# Altium footprint library Amin-Library.PcbLib: 601 footprints (part 9 of 38)
Each footprint in its own frame and in the unit in brackets; x right, y up, seen from the top. Pads: shape width x height; smd on the part's side, far side on the other; paste and mask are expansions set on the pad; w line width, h text height; cw(c..) or ccw(c..) is an arc to the next point about the centre after c.
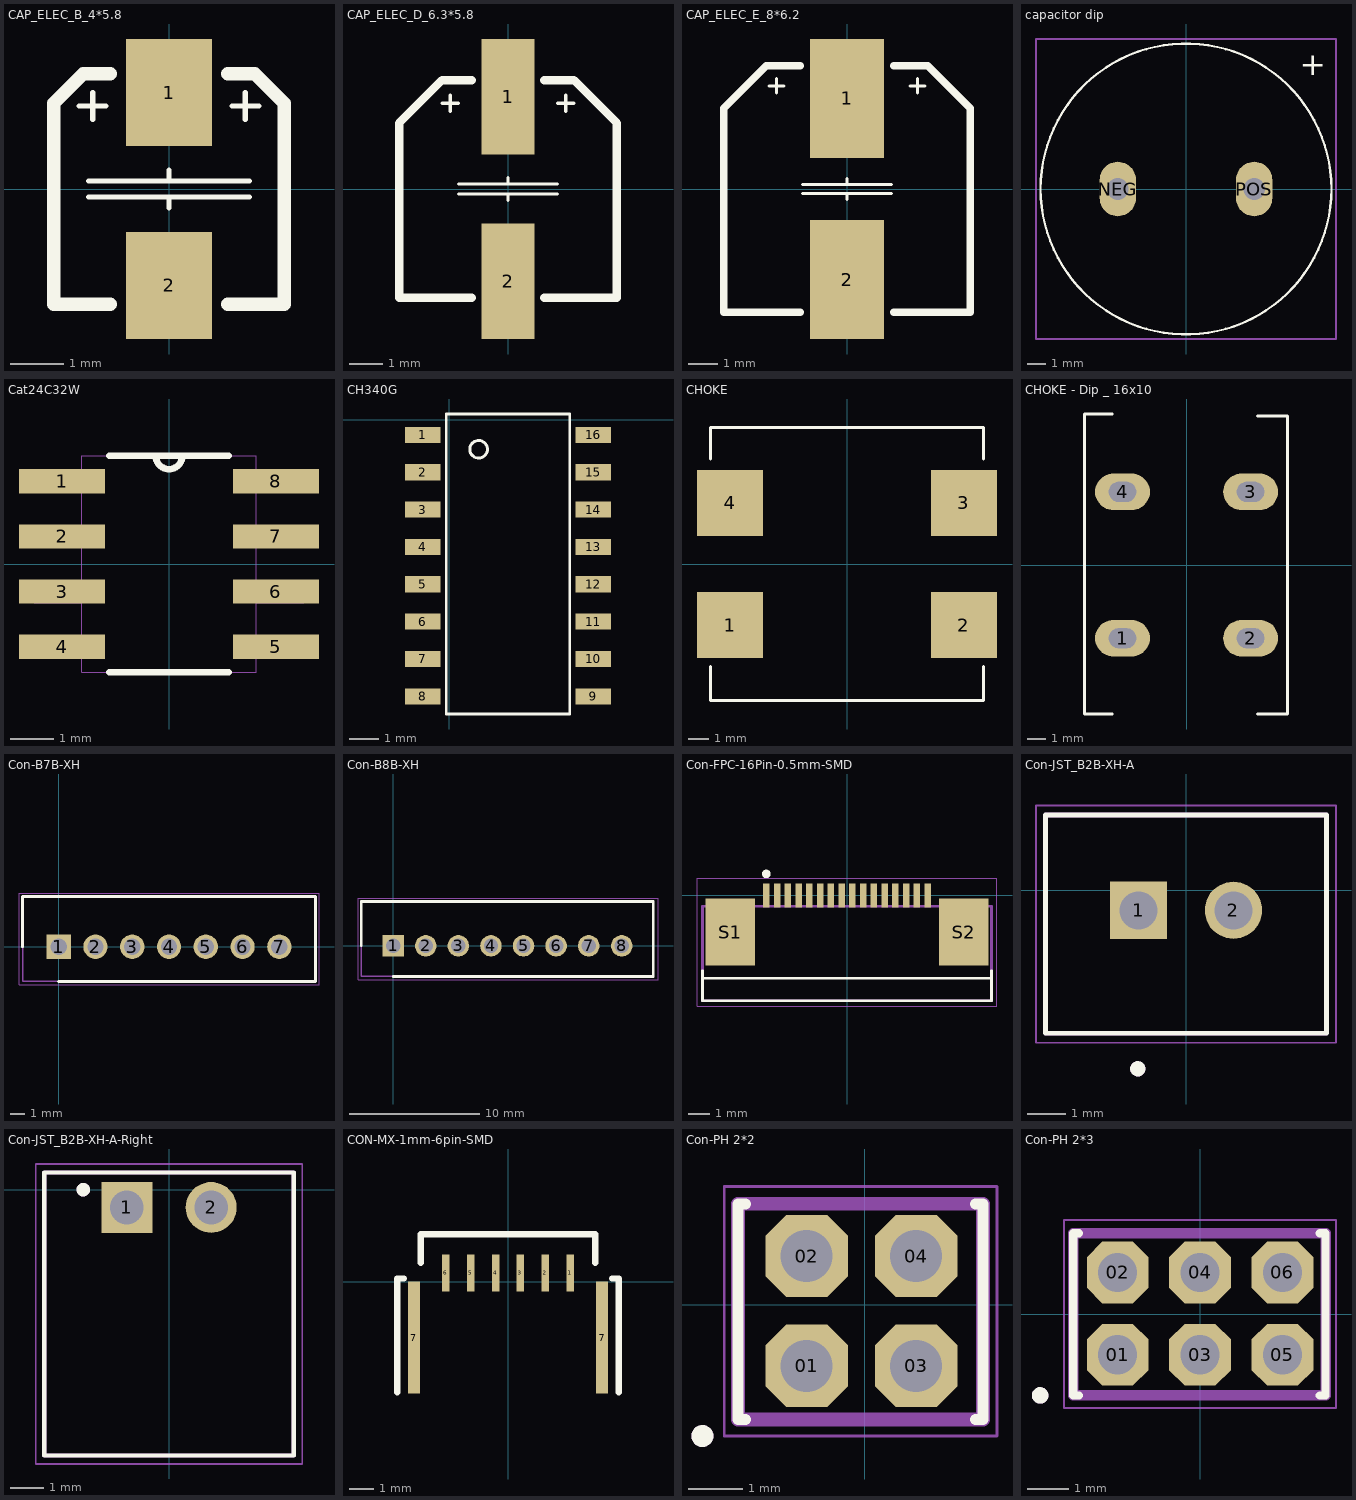
[diagram p8: the footprints below, top view; thin cyan lines are the x and y axes]

## CAP_ELEC_B_4*5.8 [mm] "Size B - Diameter 4 - Height 5.8"
pads (2):
  rect 1.6x2 smd: 1(0,1.8) 2(0,-1.8)
Top Overlay:
  lines w0.1: -1.675,1.55 -1.175,1.55 ; -1.5,-0.15 1.5,-0.15 ; -1.5,0.15 1.5,0.15 ; -1.425,1.3 -1.425,1.8 ; 0,-0.35 0,-0.15 ; 0,0.15 0,0.35 ; 1.175,1.55 1.675,1.55 ; 1.425,1.3 1.425,1.8
  lines w0.254: -1.1,-2.15 -2.15,-2.15 -2.15,1.6 -1.6,2.15 -1.1,2.15 ; 1.1,-2.15 2.15,-2.15 2.15,1.6 1.6,2.15 1.1,2.15

## CAP_ELEC_D_6.3*5.8 [mm] "Size D - Diameter 6.3 - Height 5.8"
pads (2):
  rect 1.6x3.5 smd: 1(0,2.8) 2(0,-2.8)
Top Overlay:
  lines w0.1: -2,2.6 -1.5,2.6 ; -1.75,2.35 -1.75,2.85 ; -1.5,-0.15 1.5,-0.15 ; -1.5,0.15 1.5,0.15 ; 0,-0.35 0,-0.15 ; 0,0.15 0,0.35 ; 1.5,2.6 2,2.6 ; 1.75,2.35 1.75,2.85
  lines w0.254: -1.1,-3.3 -3.3,-3.3 -3.3,2 -2,3.3 -1.1,3.3 ; 1.1,-3.3 3.3,-3.3 3.3,1.975 ; 1.1,3.3 1.975,3.3 ; 2,3.3 3.3,2

## CAP_ELEC_E_8*6.2 [mm] "Size E - Diameter 8 - Height 6.2"
pads (2):
  rect 2.5x4 smd: 1(0,3.05) 2(0,-3.05)
Top Overlay:
  lines w0.1: -2.625,3.475 -2.125,3.475 ; -2.375,3.225 -2.375,3.725 ; -1.5,-0.15 1.5,-0.15 ; -1.5,0.15 1.5,0.15 ; 0,-0.35 0,-0.15 ; 0,0.15 0,0.35 ; 2.125,3.475 2.625,3.475 ; 2.375,3.225 2.375,3.725
  lines w0.254: -1.575,-4.15 -4.15,-4.15 -4.15,2.725 -2.725,4.15 -1.575,4.15 ; 1.57,4.15 2.725,4.15 4.15,2.725 4.15,-4.15 1.575,-4.15

## capacitor dip [mm]
pads (2):
  oval 2x3 hole 1.2: NEG(-3.75,0) POS(3.75,0)
Top Overlay:
  circle w0.127: c0,0 r8
  text "+" at 6.251,6.251 h1.27
Mechanical 15:
  lines w0.127: -8.25,-8.25 -8.25,8.25 8.25,8.25 8.25,-8.25 -8.25,-8.25
3D body "User Library-ECEC2DP271BJ.step": height 25.01, standoff 0.01, extent -10.824,-10.873 11.176,11.127

## Cat24C32W [mil]
pads (8):
  rect 78x22 smd: 1(-97,75) 2(-97,25) 3(-97,-25) 4(-97,-75) 5(97,-75) 6(97,-25) 7(97,25) 8(97,75)
Top Overlay:
  lines w6: -54,-98 54,-98 ; -54,98 -12,98 ; 54,98 12,98 ; -12,98 ccw(c0,98) 12,98 ; -12,98 12,98
Mechanical 4:
  lines w0: -122,-85 -122,-65 ; -122,-85 -79,-85 ; -122,-85 -122,-65 ; -122,-85 -79,-85 ; -122,-65 -79,-65 ; -122,-65 -79,-65 ; -122,-35 -122,-15 ; -122,-35 -79,-35 ; -122,-35 -122,-15 ; -122,-35 -79,-35 ; -122,-15 -79,-15 ; -122,-15 -79,-15 ; -122,15 -122,35 ; -122,15 -79,15 ; -122,15 -122,35 ; -122,15 -79,15 ; -122,35 -79,35 ; -122,35 -79,35 ; -122,65 -122,85 ; -122,65 -79,65 ; -122,65 -122,85 ; -122,65 -79,65 ; -122,85 -79,85 ; -122,85 -79,85 ; -79,-98 79,-98 ; -79,-98 -79,98 ; -79,-98 79,-98 ; -79,-98 -79,98 ; -79,-85 -79,-65 ; -79,-85 -79,-65 ; -79,-35 -79,-15 ; -79,-35 -79,-15 ; -79,15 -79,35 ; -79,15 -79,35 ; -79,65 -79,85 ; -79,65 -79,85 ; -79,98 -12,98 ; -79,98 -12,98 ; -12,98 ccw(c0,98) 12,98 ; -12,98 ccw(c0,98) 12,98 ; -12,98 12,98 ; -12,98 12,98 ; 12,98 79,98 ; 12,98 79,98 ; 79,-98 79,98 ; 79,-98 79,98 ; 79,-85 79,-65 ; 79,-85 122,-85 ; 79,-85 79,-65 ; 79,-85 122,-85 ; 79,-65 122,-65 ; 79,-65 122,-65 ; 79,-35 79,-15 ; 79,-35 122,-35 ; 79,-35 79,-15 ; 79,-35 122,-35 ; 79,-15 122,-15 ; 79,-15 122,-15 ; 79,15 79,35 ; 79,15 122,15 ; 79,15 79,35 ; 79,15 122,15 ; 79,35 122,35 ; 79,35 122,35 ; 79,65 79,85 ; 79,65 122,65 ; 79,65 79,85 ; 79,65 122,65 ; 79,85 122,85 ; 79,85 122,85 ; 122,-85 122,-65 ; 122,-85 122,-65 ; 122,-35 122,-15 ; 122,-35 122,-15 ; 122,15 122,35 ; 122,15 122,35 ; 122,65 122,85 ; 122,65 122,85
3D body "MAX1562ESA+--3DModel-STEP-56544.STEP": height 59.56, standoff -9.34, extent -118.1,-96.46 118.11,96.45

## CH340G [mm]
pads (16):
  rect 1.2x0.55 smd: 1(-0.9,-0.51) 2(-0.9,-1.78) 3(-0.9,-3.05) 4(-0.9,-4.32) 5(-0.9,-5.59) 6(-0.9,-6.86) 7(-0.9,-8.13) 8(-0.9,-9.4) 9(4.9,-9.4) 10(4.9,-8.13) 11(4.9,-6.86) 12(4.9,-5.59) 13(4.9,-4.32) 14(4.9,-3.05) 15(4.9,-1.78) 16(4.9,-0.51)
Top Overlay:
  circle w0.1: c1,-1 r0.3
  lines w0.1: -0.1,-10 -0.1,0.2 4.1,0.2 4.1,-10 -0.1,-10
3D body "SO-16.step": height 1.45, standoff 0, extent -0.953,-9.9 4.953,0.082

## CHOKE [mm] "SMD Common MODE Filter"
height 10
pads (4):
  rect 3.2x3.2 smd: 1(-5.65,-2.95) 2(5.65,-2.95) 3(5.65,2.95) 4(-5.65,2.95)
Top Overlay:
  lines w0.152: -6.6,-4.953 -6.6,-6.6 6.6,-6.6 6.6,-4.953 ; -6.6,5.08 -6.6,6.6 6.6,6.6 6.6,5.08
3D body "Coilcraft-CF3094-AL.step": height 5.16, standoff -0.3, extent -6.35,-6.223 6.35,6.477

## CHOKE - Dip _ 16x10 [mm] "SMD Common MODE Filter ECMT1V1717S"
height 10
pads (4):
  oval 3x2 hole 1.1 slot 1.5 at 0 deg: 1(-3.5,-4) 2(3.5,-4) 3(3.5,4) 4(-3.5,4)
Top Overlay:
  lines w0.152: -4.064,-8.141 -5.584,-8.141 -5.584,8.255 -4.064,8.255 ; 3.876,-8.141 5.523,-8.141 5.523,8.141 3.876,8.141
3D body "User Library-UU9LF.step": height 16.31, standoff -3, extent -5.5,-8.141 5.5,8.141

## Con-B7B-XH [mm]
pads (7):
  rect 1.65x1.65 hole 1.1: 1(0,0)
  round 1.65 hole 1.1: 2(2.5,0) 3(5,0) 4(7.5,0) 5(10,0) 6(12.5,0) 7(15,0)
Top Overlay:
  lines w0.2: -2.45,0 -2.45,3.4 17.45,3.4 17.45,-2.35 0,-2.35
Mechanical 13:
  lines w0.1: -2.45,-2.35 -2.45,3.4 17.45,3.4 17.45,-2.35 -2.45,-2.35
Mechanical 15:
  lines w0.05: -2.7,-2.6 -2.7,3.65 17.7,3.65 17.7,-2.6 -2.7,-2.6
3D body "B7B-XH-A_LF__SN_.stp": height 7, standoff -3.4, extent -2.45,-2.875 17.45,2.875

## Con-B8B-XH [mm]
pads (8):
  rect 1.65x1.65 hole 1.1: 1(0,0)
  round 1.65 hole 1.1: 2(2.5,0) 3(5,0) 4(7.5,0) 5(10,0) 6(12.5,0) 7(15,0) 8(17.54,0)
Top Overlay:
  lines w0.2: -2.45,0 -2.45,3.4 19.963,3.4 19.963,-2.35 0,-2.35
Mechanical 13:
  lines w0.1: -2.45,-2.35 19.963,-2.35 19.963,3.4 -2.45,3.4 -2.45,-2.35
Mechanical 15:
  lines w0.05: -2.7,-2.6 20.32,-2.6 20.32,3.65 -2.7,3.65 -2.7,-2.6
3D body "User Library-B8B-XH-A.step": height 7.01, standoff -3.39, extent -2.437,-2.35 19.963,3.4

## Con-FPC-16Pin-0.5mm-SMD [mm]
pads (18):
  rect 0.3x1.1 smd: 1(-3.75,0) 2(-3.25,0) 3(-2.75,0) 4(-2.25,0) 5(-1.75,0) 6(-1.25,0) 7(-0.75,0) 8(-0.25,0) 9(0.25,0) 10(0.75,0) 11(1.25,0) 12(1.75,0) 13(2.25,0) 14(2.75,0) 15(3.25,0) 16(3.75,0)
  rect 2.3x3.1 smd: S1(-5.42,-1.7) S2(5.42,-1.7)
Top Overlay:
  circle w0.2: c-3.75,1 r0.1
  lines w0.127: -6.715,-3.5 -6.715,-4.9 6.715,-4.9 6.715,-3.5 ; -6.7,-3.85 6.7,-3.85
Mechanical 13:
  lines w0.127: -6.715,-4.9 -6.715,-0.5 6.715,-0.5 6.715,-4.9 -6.715,-4.9
Mechanical 15:
  lines w0.05: -6.965,-5.15 -6.965,0.8 6.965,0.8 6.965,-5.15 -6.965,-5.15
3D body "Con-FPC-16Pin-0.5mm-SMD.stp": height 2.07, standoff 0.02, extent -6.715,-4.729 6.715,0.381

## Con-JST_B2B-XH-A [mm]
pads (2):
  rect 1.508x1.508 hole 1: 1(-1.25,-0.525)
  round 1.508 hole 1: 2(1.25,-0.525)
Top Overlay:
  circle w0.2: c-1.27,-4.699 r0.1
  lines w0.127: -3.7,-3.764 3.7,-3.764 3.7,1.986 -3.7,1.986 -3.7,-3.764
Mechanical 13:
  circle w0.2: c-1.27,-4.699 r0.1
  lines w0.127: -3.7,-3.764 3.7,-3.764 3.7,1.986 -3.7,1.986 -3.7,-3.764
Mechanical 15:
  lines w0.05: -3.95,-4.014 3.95,-4.014 3.95,2.236 -3.95,2.236 -3.95,-4.014
3D body "User Library-CONN, HDR, 2_5mm X 2.step": height 7.12, standoff -3.8, extent -3.708,-3.886 3.683,1.854

## Con-JST_B2B-XH-A-Right [mm]
pads (2):
  rect 1.508x1.508 hole 1: 1(-1.25,-0.525)
  round 1.508 hole 1: 2(1.25,-0.525)
Top Overlay:
  circle w0.2: c-2.54,0 r0.1
  lines w0.127: -3.7,-7.874 -3.7,0.508 3.7,0.508 3.7,-7.874 -3.7,-7.874
Mechanical 13:
  circle w0.2: c-2.54,0 r0.1
  lines w0.127: -3.7,-7.874 -3.7,0.508 3.7,0.508 3.7,-7.874 -3.7,-7.874
Mechanical 15:
  lines w0.05: -3.95,-8.128 -3.95,0.762 3.95,0.762 3.95,-8.128 -3.95,-8.128
3D body "User Library-JST-XH-2_5mm-2.step": height 5.95, standoff -3.35, extent -3.7,-7.874 3.8,-0.234

## CON-MX-1mm-6pin-SMD [mm]
pads (8):
  rect 0.3x1.5 smd: 1(2.5,0.35) 2(1.5,0.35) 3(0.5,0.35) 4(-0.5,0.35) 5(-1.5,0.35) 6(-2.5,0.35)
  rect 0.5x4.5 smd: 7(-3.777,-2.25) 7(3.777,-2.25)
Top Overlay:
  lines w0.254: -4.445,-4.445 -4.445,0.127 -4.191,0.127 ; -3.5,0.762 -3.5,1.905 3.5,1.905 3.5,0.762 ; 4.191,0.127 4.445,0.127 4.445,-4.445

## Con-PH 2*2 [mm]
pads (4):
  oct 1.501x1.501 / inner oct 1.524x1.524 / far side oct 1.501x1.501 hole 0.95: 01(-1.063,-1.116) 02(-1.063,0.889) 03(0.937,-1.116) 04(0.937,0.889)
Top Overlay:
  circle w0.2: c-2.967,-2.4 r0.1
  lines w0.2: -2.177,-2.097 -2.317,-2.097 -2.317,1.843 -2.177,1.843 ; 2.019,-2.097 2.159,-2.097 2.159,1.843 2.019,1.843
Top Courtyard:
  lines w0.254: -2.317,-2.097 -2.317,1.843 2.159,1.843 2.159,-2.097 -2.317,-2.097
Mechanical 13:
  circle w0.2: c-2.967,-2.4 r0.1
  lines w0.1: -2.317,-2.097 -2.317,1.843 ; -2.317,-2.097 2.159,-2.097 2.159,1.843 -2.317,1.843 ; -2.317,-2.097 -2.317,1.843
Mechanical 15:
  lines w0.05: -2.567,-2.4 -2.567,2.159 2.413,2.159 2.413,-2.4 -2.567,-2.4
3D body "62000421121.stp": height 6.01, standoff -2.69, extent -2.127,-2.127 1.873,1.873

## Con-PH 2*3 [mm]
pads (6):
  oct 1.501x1.501 / inner oct 1.524x1.524 / far side oct 1.501x1.501 hole 0.95: 01(-2,-0.984) 02(-2,1.016) 03(0,-0.984) 04(0,1.016) 05(2,-0.984) 06(2,1.016)
Top Overlay:
  circle w0.2: c-3.883,-1.97 r0.1
  lines w0.2: -2.939,-1.97 -3.079,-1.97 -3.079,1.97 -2.939,1.97 ; 2.908,-1.97 3.048,-1.97 3.048,1.97 2.908,1.97
Top Courtyard:
  lines w0.254: -3.079,-1.97 -3.079,1.97 3.048,1.97 3.048,-1.97 -3.079,-1.97
Mechanical 13:
  circle w0.2: c-3.883,-1.97 r0.1
  lines w0.1: 2.978,1.97 -3.079,1.97 ; -3.079,-1.97 -3.079,1.97 ; -3.079,-1.97 3.048,-1.97 3.048,1.97 -3.079,1.97 ; -3.079,-1.97 -3.079,-1.716 -3.079,1.97
Mechanical 15:
  lines w0.05: -3.302,-2.273 3.302,-2.273 3.302,2.286 -3.302,2.286 -3.302,-2.273
3D body "62000621121.stp": height 6.01, standoff -2.69, extent -3,-2 3,2